# Altium integrated library PC_Int_Lib.IntLib: 59 symbols (part 2 of 2)
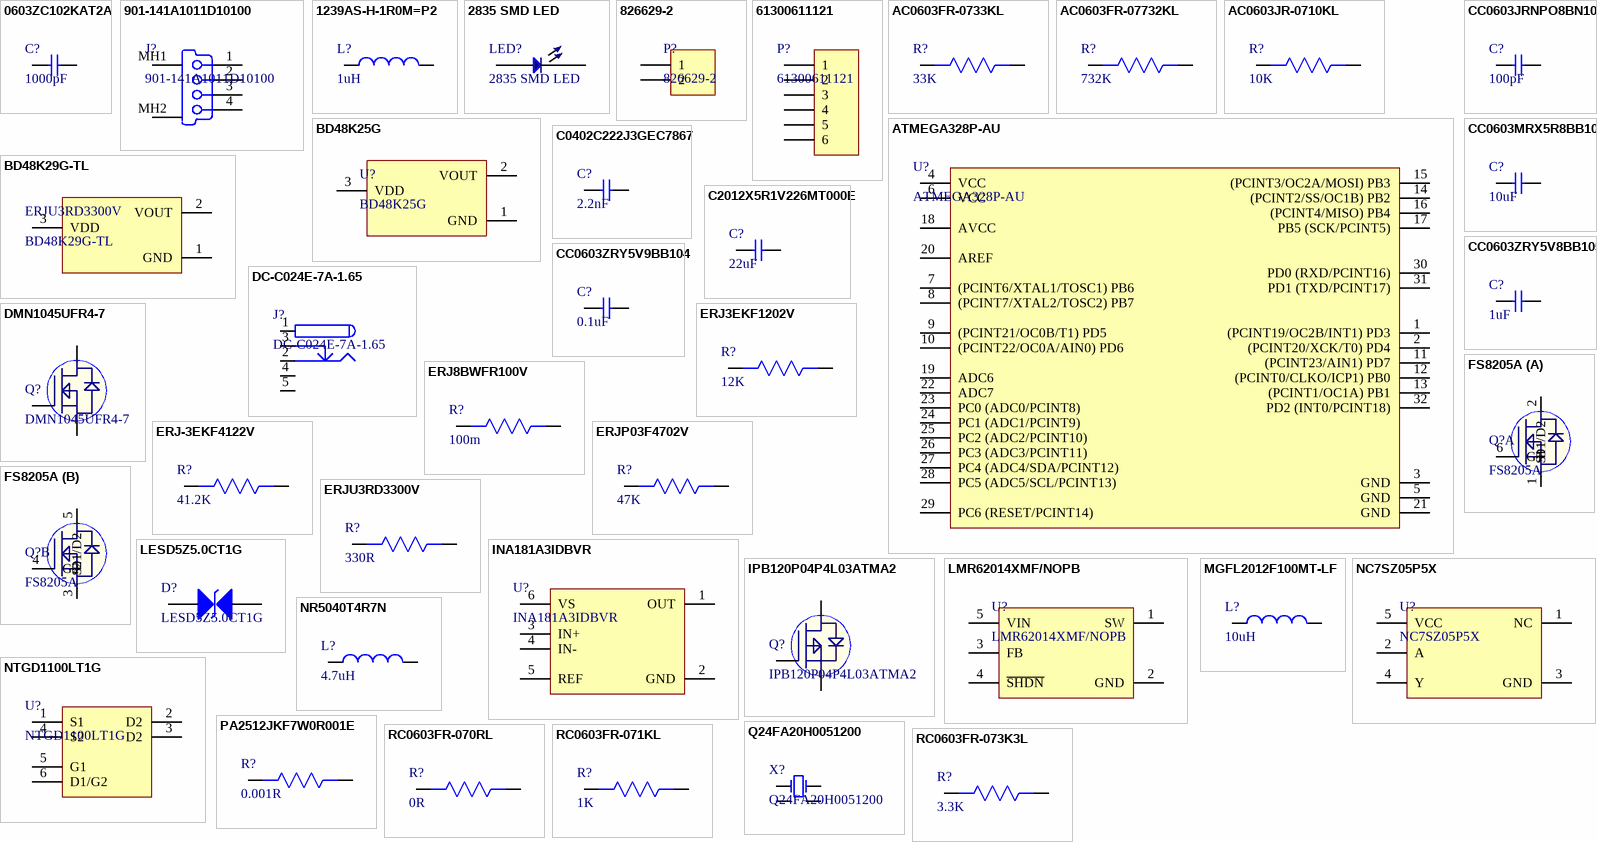
[diagram p2: symbols 0603ZC102KAT2A to RC0603FR-073K3L]

## LMR62014XMF/NOPB
designator U?
IC REG BOOST ADJ 2A SOT23-5; Manufacturer: TI National Semiconductor; Output Type: Adjustable; Output Configuration: Positive; Switching Frequency: 1.6MHz; Max Output Current: 1.4A; Min Input Voltage: 2.7V; Max Input Voltage: 14V; Number of Outputs: 1; Output Voltage: 20V; Quiescent Current: 2mA; Min Output Voltage: 3V; Synchronous Rectifier: No; Supplier 1: Digi-Key; Manufacturer Part Number: LMR62014XMF/NOPB; RoHS: Yes; Category: Power Supply Modules; Stock 1: 5493; Pricing 1: 1=0.96000, 10=0.86000, 25=0.81600, 100=0.67040, 250=0.62672, 500=0.55384 (USD); Mount: Surface Mount; Case/Package: SOT-23-5; Number of Pins: 5; Contact Plating: Tin,Matte; Min Operating Temperature: -40°C; Max Operating Temperature: 125°C; Output Current: 1.4A; Packaging: Tape and Reel; Package Quantity: 1000; Topology: Boost; Max Output Voltage: 20V; Radiation Hardening: No; REACH SVHC: No SVHC; Lead Free: Lead Free; ComponentLink1URL: https://datasheet.ciiva.com/3231/lmr62014-3231410.pdf?src-supplier=Avnet; ComponentLink1Description: https://datasheet.ciiva.com/3231/lmr62014-3231410.pdf?src-supplier=Avnet; ComponentLink2URL: https://datasheet.ciiva.com/23854/1777788-23854326.pdf?src-supplier=Newark; ComponentLink2Description: https://datasheet.ciiva.com/23854/1777788-23854326.pdf?src-supplier=Newark; ComponentLink3URL: https://datasheet.ciiva.com/4879/snvs735a-74121-4879731.pdf?src-supplier=Mouser; ComponentLink3Description: https://datasheet.ciiva.com/4879/snvs735a-74121-4879731.pdf?src-supplier=Mouser; ComponentLink4URL: https://datasheet.ciiva.com/22669/1716576-22669414.pdf?src-supplier=Element14; ComponentLink4Description: https://datasheet.ciiva.com/22669/1716576-22669414.pdf?src-supplier=Element14; ComponentLink5URL: https://datasheet.ciiva.com/6603/lmr62014-6603804.pdf?src-supplier=Digi-Key; ComponentLink5Description: https://datasheet.ciiva.com/6603/lmr62014-6603804.pdf?src-supplier=Digi-Key; ComponentLink6URL: https://datasheet.ciiva.com/6603/lmr62014-6603807.pdf?src-supplier=Digi-Key; ComponentLink6Description: https://datasheet.ciiva.com/6603/lmr62014-6603807.pdf?src-supplier=Digi-Key; Supplier Part Number 1: LMR62014XMF/NOPBCT-ND
footprint SOT23-5 (SOT23-5 Package)
pins: 1 SW, 2 GND, 3 FB, 4 ~{SH}~{DN}, 5 VIN

## MGFL2012F100MT-LF
designator L?, comment 10uH
500mA 10uH ±20% 320mΩ 0805 Inductors; Manufacturer: Microgate; Manufacturer Part No:: MGFL2012F100MT-LF; Value: 10uH; Package: 0805; ComponentLink1Description: New link; ComponentLink1URL: https://lcsc.com/product-detail/Inductors-SMD_microgate-MGFL2012F100MT-LF_C281113.html
footprint Ind0805 (Inductor 0805)
pins: 1, 2

## NC7SZ05P5X
designator U?
IC INVERTER OD 1CH 1-INP SC70-5; Manufacturer: ON Semiconductor / Fairchild; Number of Terminals/Pins: 5; Number of Circuits: 1; Max Supply Voltage: 5.5V; Min Supply Voltage: 1.65V; Propagation Delay: 13.4ns; Logic Function: Buffer,Inverter; Output Current: 32mA; Quiescent Current: 2uA; Turn-On Delay Time: 4.3ns; Polarity: Inverting; Schmitt Trigger Input: No; Input Type: SINGLE-ENDED; ComponentLink1URL: https://datasheet.ciiva.com/3231/lmr62014-3231410.pdf?src-supplier=Avnet; ComponentLink1Description: https://datasheet.ciiva.com/3231/lmr62014-3231410.pdf?src-supplier=Avnet; ComponentLink2URL: https://datasheet.ciiva.com/23854/1777788-23854326.pdf?src-supplier=Newark; ComponentLink2Description: https://datasheet.ciiva.com/23854/1777788-23854326.pdf?src-supplier=Newark; ComponentLink3URL: https://datasheet.ciiva.com/4879/snvs735a-74121-4879731.pdf?src-supplier=Mouser; ComponentLink3Description: https://datasheet.ciiva.com/4879/snvs735a-74121-4879731.pdf?src-supplier=Mouser; ComponentLink4URL: https://datasheet.ciiva.com/22669/1716576-22669414.pdf?src-supplier=Element14; ComponentLink4Description: https://datasheet.ciiva.com/22669/1716576-22669414.pdf?src-supplier=Element14; ComponentLink5URL: https://datasheet.ciiva.com/6603/lmr62014-6603804.pdf?src-supplier=Digi-Key; ComponentLink5Description: https://datasheet.ciiva.com/6603/lmr62014-6603804.pdf?src-supplier=Digi-Key; ComponentLink6URL: https://datasheet.ciiva.com/6603/lmr62014-6603807.pdf?src-supplier=Digi-Key; ComponentLink6Description: https://datasheet.ciiva.com/6603/lmr62014-6603807.pdf?src-supplier=Digi-Key; Supplier 1: Digi-Key; Manufacturer Part Number: NC7SZ05P5X; RoHS: Yes; Category: Amplifiers - Op Amps, Buffer, Instrumentation; Stock 1: 165573; Pricing 1: 1=0.41000, 10=0.30800, 25=0.26920, 100=0.17430, 250=0.14428, 500=0.11544, 1000=0.08850 (USD); Mount: Surface Mount; Case/Package: SC; Number of Pins: 5; Weight: 23g; Min Operating Temperature: -40°C; Max Operating Temperature: 85°C; Packaging: Tape and Reel; Package Quantity: 1; Low Level Output Current: 32mA; Number of Gates: 1; Number of Channels: 1; Number of Inputs: 1; Number of Outputs: 1; Max Output Current: 32mA; Number of Elements: 1; Termination: SMD/SMT; Series: 7SZ; Technology: CMOS; Number of Functions: 1; Supply Voltage-Nom: 5.5V; Length: 2mm; Width: 1.25mm; Height: 1mm; Radiation Hardening: No; REACH SVHC: No SVHC; Lead Free: Lead Free; RoHS Compliant: Yes; ComponentLink7URL: https://datasheet.ciiva.com/5701/678459-5701517.pdf?src-supplier=Farnell; ComponentLink7Description: https://datasheet.ciiva.com/5701/678459-5701517.pdf?src-supplier=Farnell; ComponentLink8URL: https://datasheet.ciiva.com/26097/nc7sz05-26097353.pdf?src-supplier=Avnet+Europe; ComponentLink8Description: https://datasheet.ciiva.com/26097/nc7sz05-26097353.pdf?src-supplier=Avnet+Europe; ComponentLink9URL: https://datasheet.ciiva.com/46415/678459-46415099.pdf?src-supplier=Element14; ComponentLink9Description: https://datasheet.ciiva.com/46415/678459-46415099.pdf?src-supplier=Element14; ComponentLink10URL: https://datasheet.ciiva.com/16783/nc7sz05-16783085.pdf?src-supplier=Future+Electronics; ComponentLink10Description: https://datasheet.ciiva.com/16783/nc7sz05-16783085.pdf?src-supplier=Future+Electronics; ComponentLink11URL: https://datasheet.ciiva.com/1861/nc7sz05-1861934.pdf?src-supplier=Digi-Key; ComponentLink11Description: https://datasheet.ciiva.com/1861/nc7sz05-1861934.pdf?src-supplier=Digi-Key; ComponentLink12URL: https://datasheet.ciiva.com/7970/678459-7970639.pdf?src-supplier=Element14; ComponentLink12Description: https://datasheet.ciiva.com/7970/678459-7970639.pdf?src-supplier=Element14; ComponentLink13URL: https://datasheet.ciiva.com/1861/nc7sz05-1861932.pdf?src-supplier=Digi-Key; ComponentLink13Description: https://datasheet.ciiva.com/1861/nc7sz05-1861932.pdf?src-supplier=Digi-Key; ComponentLink14URL: https://datasheet.ciiva.com/5701/nc7sz05-5701516.pdf?src-supplier=Farnell; ComponentLink14Description: https://datasheet.ciiva.com/5701/nc7sz05-5701516.pdf?src-supplier=Farnell; ComponentLink15URL: https://datasheet.ciiva.com/1861/nc7sz05-1861933.pdf?src-supplier=Digi-Key; ComponentLink15Description: https://datasheet.ciiva.com/1861/nc7sz05-1861933.pdf?src-supplier=Digi-Key; Supplier Part Number 1: NC7SZ05P5XCT-ND
footprint NC7SZ05P5X
pins: 1 NC, 2 A, 3 GND, 4 Y, 5 VCC

## NR5040T4R7N
designator L?, comment 4.7uH
Inductor Power Shielded Wirewound 4.7uH 30% 100KHz Ferrite 3.1A 0.0377Ohm DCR T/R; Manufacturer: Taiyo Yuden; Manufacturer Part Number: NR5040T4R7N; Self Resonant Frequency: 28MHz; Saturation Current: 3.3A; DC Resistance (DCR): 37.7mR; Supplier 1: Digi-Key; RoHS: Yes; Category: Fixed Inductors; Stock 1: 62864; Pricing 1: 1=0.48000, 10=0.42700, 25=0.37360, 50=0.32000, 100=0.29340, 250=0.26676, 500=0.25074 (USD); Mount: Surface Mount; Case/Package: Nonstandard; Number of Pins: 2; Core Material: Ferrite; Min Operating Temperature: -25°C; Max Operating Temperature: 120°C; Packaging: Tape and Reel; Inductance Tolerance: 30%; Package Quantity: 1500; Current Rating: 3.1A; Tolerance: 30%; Shielding: Shielded; Inductance: 4.7uH; Max DC Current: 3.3A; Termination: SMD/SMT; Resistor Type: Wirewound; Test Frequency: 100kHz; RMS Current (Irms): 3.1A; Series: NR; Length: 0.193inch; Width: 4.9mm; Height: 4mm; Height - Seated (Max): 0.161inch; Depth: 5.1mm; Radiation Hardening: No; REACH SVHC: Unknown; Halogen Free: Halogen Free; RoHS Compliant: Yes; ComponentLink1URL: https://datasheet.ciiva.com/8502/nr5040t4r7n-ss-8502907.pdf?src-supplier=Avnet; ComponentLink1Description: https://datasheet.ciiva.com/8502/nr5040t4r7n-ss-8502907.pdf?src-supplier=Avnet; ComponentLink2URL: https://datasheet.ciiva.com/1044/wound04-e-1044092.pdf?src-supplier=Digi-Key; ComponentLink2Description: https://datasheet.ciiva.com/1044/wound04-e-1044092.pdf?src-supplier=Digi-Key; ComponentLink3URL: https://datasheet.ciiva.com/1044/wound04-e-1044093.pdf?src-supplier=Digi-Key; ComponentLink3Description: https://datasheet.ciiva.com/1044/wound04-e-1044093.pdf?src-supplier=Digi-Key; ComponentLink4URL: https://datasheet.ciiva.com/4960/wound04-e-4960327.pdf?src-supplier=Mouser; ComponentLink4Description: https://datasheet.ciiva.com/4960/wound04-e-4960327.pdf?src-supplier=Mouser; ComponentLink5URL: https://datasheet.ciiva.com/1044/wound04-e-1044091.pdf?src-supplier=Digi-Key; ComponentLink5Description: https://datasheet.ciiva.com/1044/wound04-e-1044091.pdf?src-supplier=Digi-Key; Supplier Part Number 1: 587-2373-1-ND
footprint NR5040T4R7N
pins: 1, 2

## NTGD1100LT1G
designator U?
IC PWR DRIVER P-CHAN 1:1 6TSOP; Manufacturer: onsemi; Manufacturer Part No:: NTGD1100LT1G; Package: Custom; ComponentLink1Description: New link; ComponentLink1URL: https://www.digikey.co.uk/en/products/detail/onsemi/NTGD1100LT1G/1484846
footprint NTGD1100LT1G
pins: 1 S1, 2 D2, 3 D2, 4 S2, 5 G1, 6 D1/G2

## PA2512JKF7W0R001E
designator R?, comment 0.001R
RES 0.001 OHM 5% 2W 2512; Manufacturer: YEGEO; Manufacturer Part No:: PA2512JKF7W0R001E; Value: 0.001R; Package: 2512; ComponentLink1Description: New link; ComponentLink1URL: https://www.digikey.ca/en/products/detail/yageo/PA2512JKF7W0R001E/5913675?s=N4IgTCBcDaIAoEEwFYCMYBSBpAYgdgHUAGAJSKNQFEQBdAXyA
footprint RES 2512
pins: 1, 2

## Q24FA20H0051200
designator X?
16MHz SMD Crystal Resonator 10pF 80Ω ±10ppm; Manufacturer: Seiko Epson; Frequency: 16MHz; Crystal Type: SMD Crystal; Load Capacitance: 10pF; Equivalent Series Resistance (ESR): 80Ω; Frequency Tolerance: ±10ppm; Operating Temperature: -40℃~+85℃
footprint Q24FA20H0051200 (16MHz SMD Crystal Resonator 10pF 80O ±10ppm)
pins: 1 OSC1, 2 GND, 3 OSC2, 4 GND

## RC0603FR-070RL
designator R?, comment 0R
RES SMD 0R, 1%, 0.1W, 0603; Manufacturer: Yageo; Manufacturer Part Number: RC0603FR-070RL; Resistance: 0mR; Power Rating: 100mW; Voltage Rating (DC): 50V; Temperature Coefficient: 200ppm/°C; Current Rating: 1A; Working Voltage: 75V; Supplier 1: Arrow Electronics; RoHS: Yes; Category: Chip SMD Resistors; Stock 1: 1270000; Pricing 1: 5000=0.00320, 5000=0.00490, 50000=0.00450, 500000=0.00250, 2500000=0.00150 (USD); Case/Package: 0603; Number of Pins: 2; Contact Plating: Tin,Matte; Case Code (Metric): 1608; Case Code (Imperial): 0603; Min Operating Temperature: -55°C; Max Operating Temperature: 155°C; Resistor Type: Thick Film; Packaging: Tape and Reel; Tolerance: 1%; Package Quantity: 5000; Voltage Rating: 50V; Number of Terminations: 2; Termination: SMD/SMT; Max Power Dissipation: 100mW; Features: Moisture Resistant; Length: 1.6mm; Width: 0.031inch; Height: 0.45mm; Depth: 0.8mm; Radiation Hardening: No; REACH SVHC: No SVHC; Lead Free: Lead Free; Military Standard: Not; ComponentLink1URL: https://datasheet.ciiva.com/11808/0900766b80f96399-11808172.pdf?src-supplier=RSComponents; ComponentLink1Description: https://datasheet.ciiva.com/11808/0900766b80f96399-11808172.pdf?src-supplier=RSComponents; ComponentLink2URL: https://datasheet.ciiva.com/5558/rc0603-272842-5558341.pdf?src-supplier=Mouser; ComponentLink2Description: https://datasheet.ciiva.com/5558/rc0603-272842-5558341.pdf?src-supplier=Mouser; ComponentLink3URL: https://datasheet.ciiva.com/46382/443971-46382072.pdf?src-supplier=Element14; ComponentLink3Description: https://datasheet.ciiva.com/46382/443971-46382072.pdf?src-supplier=Element14; ComponentLink4URL: https://datasheet.ciiva.com/29721/pyu-r-int-thick-7-29721178.pdf?src-supplier=Digi-Key; ComponentLink4Description: https://datasheet.ciiva.com/29721/pyu-r-int-thick-7-29721178.pdf?src-supplier=Digi-Key; ComponentLink5URL: https://datasheet.ciiva.com/5684/443971-5684699.pdf?src-supplier=Farnell; ComponentLink5Description: https://datasheet.ciiva.com/5684/443971-5684699.pdf?src-supplier=Farnell; ComponentLink6URL: https://datasheet.ciiva.com/7983/443971-7983627.pdf?src-supplier=Element14; ComponentLink6Description: https://datasheet.ciiva.com/7983/443971-7983627.pdf?src-supplier=Element14; ComponentLink7URL: https://datasheet.ciiva.com/29721/pyu-rc0603-51-rohs-l-4-29721179.pdf?src-supplier=Digi-Key; ComponentLink7Description: https://datasheet.ciiva.com/29721/pyu-rc0603-51-rohs-l-4-29721179.pdf?src-supplier=Digi-Key; ComponentLink8URL: https://datasheet.ciiva.com/22643/1868787-22643388.pdf?src-supplier=Element14; ComponentLink8Description: https://datasheet.ciiva.com/22643/1868787-22643388.pdf?src-supplier=Element14; Supplier Part Number 1: RC0603FR-070RL
footprint Res0603
pins: 1, 2

## RC0603FR-071KL
designator R?, comment 1K
RES SMD 1K OHM 1% 1/10W 0603; Manufacturer: Yageo; Manufacturer Part Number: RC0603FR-071KL; Resistance: 1kR; Temperature Coefficient: 100ppm/°C; Power Rating: 100mW; Voltage Rating: 50V; ComponentLink1URL: https://www.verical.com/server-webapp/html/getDatasheet?partID=409289&src-supplier=Verical; ComponentLink1Description: https://www.verical.com/server-webapp/html/getDatasheet?partID=409289&src-supplier=Verical; Supplier 1: Digi-Key; Stock 1: 21472395; Pricing 1: 1=0.1, 10=0.023, 100=0.0094, 1000=0.0042, 2500=0.0037 (USD); Case/Package: 0603; Contact Plating: Tin,Matte; Case Code (Imperial): 0603; Case Code (Metric): 1608; Min Operating Temperature: -55°C; Max Operating Temperature: 155°C; Tolerance: 1%; Composition: Thick Film; Packaging: Tape and Reel; Termination: SMD/SMT; Military Standard: Not; Length: 1.6mm; Height: 0.45mm; Depth: 0.8mm; Radiation Hardening: No; REACH SVHC: No SVHC; Lead Free: Lead Free; ComponentLink2URL: http://documents.rs-components.com/techlib://itc_doclist_GB.htm?stockno=5048928&src-supplier=RSComponents; ComponentLink2Description: http://documents.rs-components.com/techlib://itc_doclist_GB.htm?stockno=5048928&src-supplier=RSComponents; ComponentLink3URL: http://www.yageo.com/documents/recent/PYu-RC0603_51_RoHS_L_4.pdf?src-supplier=Avnet+Europe; ComponentLink3Description: http://www.yageo.com/documents/recent/PYu-RC0603_51_RoHS_L_4.pdf?src-supplier=Avnet+Europe; ComponentLink4URL: http://www.farnell.com/datasheets/2167052.pdf?src-supplier=Element14; ComponentLink4Description: http://www.farnell.com/datasheets/2167052.pdf?src-supplier=Element14; ComponentLink5URL: http://www.farnell.com/datasheets/1868787.pdf?src-supplier=Element14; ComponentLink5Description: http://www.farnell.com/datasheets/1868787.pdf?src-supplier=Element14; ComponentLink6URL: http://www.yageo.com/documents/recent/PYu-RC_Group_51_RoHS_L_2.pdf?src-supplier=Avnet; ComponentLink6Description: http://www.yageo.com/documents/recent/PYu-RC_Group_51_RoHS_L_2.pdf?src-supplier=Avnet; ComponentLink7URL: https://www.verical.com/server-webapp/html/getDatasheet?partID=404327&src-supplier=Verical; ComponentLink7Description: https://www.verical.com/server-webapp/html/getDatasheet?partID=404327&src-supplier=Verical; ComponentLink8URL: http://www.farnell.com/datasheets/443971.pdf?src-supplier=Element14; ComponentLink8Description: http://www.farnell.com/datasheets/443971.pdf?src-supplier=Element14; Supplier Part Number 1: 311-1.00KHRDKR-ND
footprint Res0603
pins: 1, 2

## RC0603FR-073K3L
designator R?, comment 3.3K
RES SMD 3.3K OHM 1% 1/10W 0603; Manufacturer: Yageo Phycomp; Manufacturer Part Number: RC0603FR-073K3L; Temperature Coefficient: 100ppm/°C; Resistance: 3.3kR; Voltage Rating (DC): 50V; Power Rating: 100mW; Supplier 1: Digi-Key; Stock 1: 6863000; Pricing 1: 1=0.1, 10=0.024, 100=0.0097, 1000=0.00437, 2500=0.00379 (USD); Mount: Surface Mount; Case/Package: 0603; Number of Pins: 2; Min Operating Temperature: -55°C; Max Operating Temperature: 155°C; Tolerance: 1%; Packaging: Cut Tape; Length: 1.6mm; Height: 0.45mm; Width: 800um; Depth: 0.8mm; REACH SVHC: No SVHC; Lead Free: Lead Free; Supplier Part Number 1: 311-3.30KHRCT-ND
footprint Res0603
pins: 1, 2

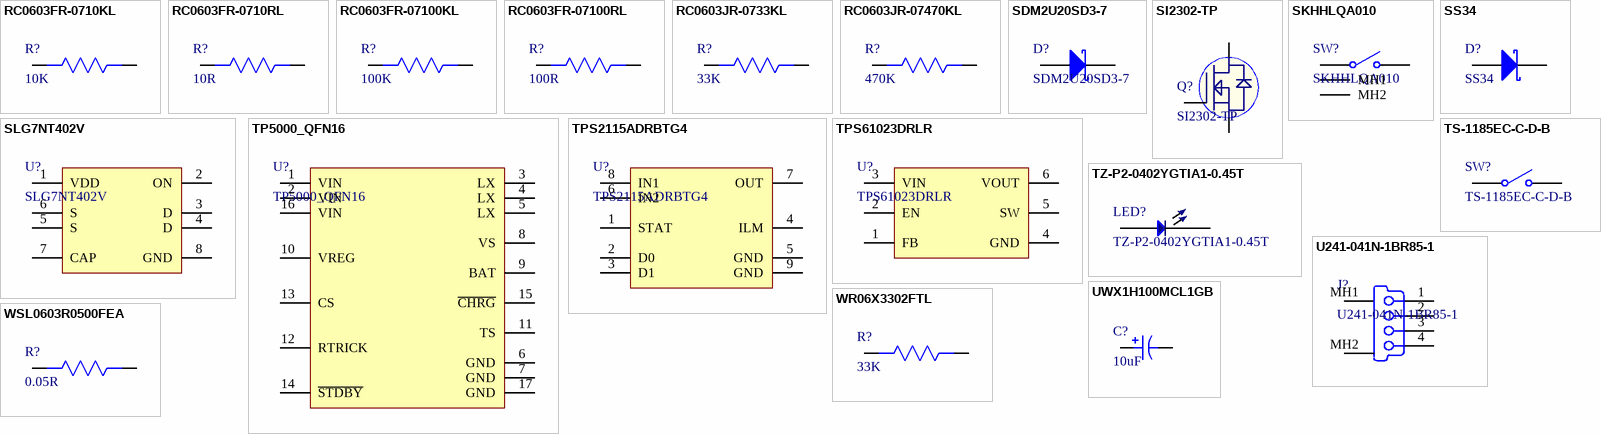
[diagram p1: symbols RC0603FR-0710KL to WSL0603R0500FEA]

## RC0603FR-0710KL
designator R?, comment 10K
RES 10K OHM 1% 1/10W 0603; Manufacturer: Yageo; Manufacturer Part Number: RC0603FR-0710KL; Resistance: 10kR; Temperature Coefficient: 100ppm/°C; Voltage Rating: 75V; Voltage Rating (DC): 50V; Power Rating: 100mW; ComponentLink1URL: https://www.verical.com/server-webapp/html/getDatasheet?partID=409289&src-supplier=Verical; ComponentLink1Description: https://www.verical.com/server-webapp/html/getDatasheet?partID=409289&src-supplier=Verical; ComponentLink2URL: http://documents.rs-components.com/techlib://itc_doclist_GB.htm?stockno=5048928&src-supplier=RSComponents; ComponentLink2Description: http://documents.rs-components.com/techlib://itc_doclist_GB.htm?stockno=5048928&src-supplier=RSComponents; ComponentLink3URL: http://www.yageo.com/documents/recent/PYu-RC0603_51_RoHS_L_4.pdf?src-supplier=Avnet+Europe; ComponentLink3Description: http://www.yageo.com/documents/recent/PYu-RC0603_51_RoHS_L_4.pdf?src-supplier=Avnet+Europe; ComponentLink4URL: http://www.farnell.com/datasheets/2167052.pdf?src-supplier=Element14; ComponentLink4Description: http://www.farnell.com/datasheets/2167052.pdf?src-supplier=Element14; ComponentLink5URL: http://www.farnell.com/datasheets/1868787.pdf?src-supplier=Element14; ComponentLink5Description: http://www.farnell.com/datasheets/1868787.pdf?src-supplier=Element14; ComponentLink6URL: http://www.yageo.com/documents/recent/PYu-RC_Group_51_RoHS_L_2.pdf?src-supplier=Avnet; ComponentLink6Description: http://www.yageo.com/documents/recent/PYu-RC_Group_51_RoHS_L_2.pdf?src-supplier=Avnet; ComponentLink7URL: https://www.verical.com/server-webapp/html/getDatasheet?partID=404327&src-supplier=Verical; ComponentLink7Description: https://www.verical.com/server-webapp/html/getDatasheet?partID=404327&src-supplier=Verical; ComponentLink8URL: http://www.farnell.com/datasheets/443971.pdf?src-supplier=Element14; ComponentLink8Description: http://www.farnell.com/datasheets/443971.pdf?src-supplier=Element14; Supplier 1: Digi-Key; Stock 1: 6533082; Pricing 1: 1=0.1, 10=0.024, 100=0.0097, 1000=0.0044, 2500=0.0038 (USD); Case/Package: 0603; Number of Pins: 2; Case Code (Imperial): 0603; Case Code (Metric): 1608; Weight: 7.1E-05oz; Size Code: 0603; Min Operating Temperature: -55°C; Max Operating Temperature: 155°C; Tolerance: 1%; Resistor Type: Thick Film; Packaging: Tape and Reel; Termination: SMD/SMT; Features: Moisture Resistant; Series: RC; Max Power Dissipation: 100mW; Number of Terminations: 2; Resistance Tolerance: 1%; Construction: Rectangular; Length: 1.6mm; Width: 0.8mm; Height: 0.45mm; Depth: 0.8mm; Lead Pitch: 0.3mm; RoHS Compliant: Yes; REACH SVHC: Unknown; Military Standard: Not; Lead Free: Lead Free; ComponentLink9URL: http://www.farnell.com/datasheets/38590.pdf?src-supplier=Element14; ComponentLink9Description: http://www.farnell.com/datasheets/38590.pdf?src-supplier=Element14; Supplier Part Number 1: 311-10.0KHRCT-ND
footprint Res0603
pins: 1, 2

## RC0603FR-0710RL
designator R?, comment 10R
RES SMD 10 OHM 1% 1/10W 0603; Manufacturer: Yageo; Manufacturer Part Number: RC0603FR-0710RL; Temperature Coefficient: 200ppm/°C; Power Rating: 100mW; Voltage Rating: 50V; Supplier 1: Digi-Key; Stock 1: 10836596; Pricing 1: 1=0.1, 10=0.046, 100=0.0187, 1000=0.0084, 2500=0.00729 (USD); Case/Package: 0603; Number of Pins: 2; Case Code (Imperial): 0603; Case Code (Metric): 1608; Contact Plating: Tin,Matte; Min Operating Temperature: -55°C; Max Operating Temperature: 155°C; Resistance: 10R; Tolerance: 1%; Composition: Thick Film; Packaging: Tape and Reel; Voltage Rating (DC): 50V; Termination: SMD/SMT; Military Standard: Not; Length: 1.6mm; Height: 0.45mm; Width: 0.8mm; Depth: 0.8mm; Radiation Hardening: No; Lead Free: Lead Free; REACH SVHC: No SVHC; ComponentLink1URL: http://www.farnell.com/datasheets/1868787.pdf?src-supplier=Element14; ComponentLink1Description: http://www.farnell.com/datasheets/1868787.pdf?src-supplier=Element14; ComponentLink2URL: http://www.yageo.com/documents/recent/PYu-RC0603_51_RoHS_L_4.pdf?src-supplier=Avnet; ComponentLink2Description: http://www.yageo.com/documents/recent/PYu-RC0603_51_RoHS_L_4.pdf?src-supplier=Avnet; ComponentLink3URL: http://documents.rs-components.com/techlib://itc_doclist_GB.htm?stockno=5048984&src-supplier=RSComponents; ComponentLink3Description: http://documents.rs-components.com/techlib://itc_doclist_GB.htm?stockno=5048984&src-supplier=RSComponents; ComponentLink4URL: http://www.yageo.com/documents/recent/PYu-RC0603_51_RoHS_L_4.pdf?src-supplier=Avnet+Europe; ComponentLink4Description: http://www.yageo.com/documents/recent/PYu-RC0603_51_RoHS_L_4.pdf?src-supplier=Avnet+Europe; Supplier Part Number 1: 311-10.0HRDKR-ND
footprint Res0603
pins: 1, 2

## RC0603FR-07100KL
designator R?, comment 100K
RES 100K OHM 1% 1/10W 0603; Manufacturer: Yageo; Manufacturer Part Number: RC0603FR-07100KL; Resistance: 100kR; Temperature Coefficient: 100ppm/°C; Voltage Rating (DC): 50V; Power Rating: 100mW; Working Voltage: 75V; Supplier 1: Digi-Key; RoHS: Yes; Category: Chip SMD Resistors; Stock 1: 4230938; Pricing 1: 1=0.10000, 10=0.02400, 100=0.00970, 1000=0.00436, 2500=0.00378 (USD); Case/Package: 0603; Number of Pins: 2; Case Code (Imperial): 0603; Case Code (Metric): 1608; Min Operating Temperature: -55°C; Max Operating Temperature: 155°C; Tolerance: 1%; Resistor Type: Thick Film; Packaging: Tape and Reel; Voltage Rating: 50V; Termination: SMD/SMT; Number of Terminations: 2; Features: Moisture Resistant; Series: RC; Max Power Dissipation: 100mW; Resistance Tolerance: 1%; Construction: Rectangular; Technology: THICK FILM; Length: 1.6mm; Width: 0.8mm; Height: 0.45mm; Depth: 0.8mm; REACH SVHC: No SVHC; Lead Free: Lead Free; Military Standard: Not; RoHS Compliant: Yes; Supplier Part Number 1: 311-100KHRCT-ND
footprint Res0603
pins: 1, 2

## RC0603FR-07100RL
designator R?, comment 100R
RES SMD 100 OHM 1% 1/10W 0603; Manufacturer: Yageo; Manufacturer Part Number: RC0603FR-07100RL; Temperature Coefficient: 100ppm/°C; Voltage Rating (DC): 50V; Power Rating: 100mW; Supplier 1: Arrow Electronics; RoHS: Yes; Category: Chip SMD Resistors; Stock 1: 3800000; Pricing 1: 5000=0.00300, 5000=0.00200, 5000=0.00450, 50000=0.00410, 500000=0.00230, 2500000=0.00140 (USD); Case/Package: 0603; Number of Pins: 2; Case Code (Imperial): 0603; Case Code (Metric): 1608; Size Code: 0603; Min Operating Temperature: -55°C; Max Operating Temperature: 155°C; Resistance: 100R; Tolerance: 1%; Resistor Type: Thick Film; Packaging: Tape and Reel; Voltage Rating: 50V; Termination: SMD/SMT; Features: Moisture Resistant; Series: RC; Max Power Dissipation: 100mW; Number of Terminations: 2; Construction: Rectangular; Resistance Tolerance: 1%; Technology: THICK FILM; Length: 1.6mm; Width: 0.8mm; Height: 0.45mm; Depth: 0.8mm; REACH SVHC: Unknown; Lead Free: Lead Free; RoHS Compliant: Yes; Military Standard: Not; Supplier Part Number 1: RC0603FR-07100RL
footprint Res0603
pins: 1, 2

## RC0603JR-0733KL
designator R?, comment 33K
Res General Purpose Thick Film 0603 33K Ohm 5% 1/10W ±100ppm/°C Molded SMD Paper T/R; Manufacturer: Yageo; Manufacturer Part Number: RC0603JR-0733KL; Resistance: 33kR; Power Rating: 100mW; Voltage Rating: 75V; Voltage Rating (DC): 50V; Supplier 1: Digi-Key; RoHS: Yes; Category: Chip SMD Resistors; Stock 1: 224875; Pricing 1: 1=0.10000, 10=0.02000, 100=0.00800, 1000=0.00360, 2500=0.00312 (USD); Case/Package: 0603; Number of Pins: 2; Case Code (Metric): 1608; Case Code (Imperial): 0603; Weight: 7.1E-05oz; Size Code: 0603; Min Operating Temperature: -55°C; Max Operating Temperature: 155°C; Tolerance: 5%; Packaging: Tape and Reel; Package Quantity: 1; Resistor Type: Thick Film; Number of Terminations: 2; Termination: SMD/SMT; Temperature Coefficient: 100ppm/°C; Max Power Dissipation: 100mW; Features: Moisture Resistant; Series: RC; Resistance Tolerance: 5%; Construction: Rectangular; Length: 1.6mm; Width: 0.8mm; Height: 0.022inch; Depth: 0.8mm; REACH SVHC: No SVHC; Military Standard: Not; Lead Free: Lead Free; RoHS Compliant: Yes; ComponentLink1URL: https://datasheet.ciiva.com/2452/pyu-r-int-thick-7-2452918.pdf?src-supplier=Digi-Key; ComponentLink1Description: https://datasheet.ciiva.com/2452/pyu-r-int-thick-7-2452918.pdf?src-supplier=Digi-Key; ComponentLink2URL: https://datasheet.ciiva.com/2452/pyu-r-int-thick-7-2452919.pdf?src-supplier=Digi-Key; ComponentLink2Description: https://datasheet.ciiva.com/2452/pyu-r-int-thick-7-2452919.pdf?src-supplier=Digi-Key; ComponentLink3URL: https://datasheet.ciiva.com/7746/443971-7746489.pdf?src-supplier=Element14; ComponentLink3Description: https://datasheet.ciiva.com/7746/443971-7746489.pdf?src-supplier=Element14; ComponentLink4URL: https://datasheet.ciiva.com/7746/443971-7746490.pdf?src-supplier=Element14; ComponentLink4Description: https://datasheet.ciiva.com/7746/443971-7746490.pdf?src-supplier=Element14; ComponentLink5URL: https://datasheet.ciiva.com/46395/443971-46395146.pdf?src-supplier=Element14; ComponentLink5Description: https://datasheet.ciiva.com/46395/443971-46395146.pdf?src-supplier=Element14; ComponentLink6URL: https://datasheet.ciiva.com/15189/getdatasheetpartid-343810-15189869.pdf?src-supplier=Verical; ComponentLink6Description: https://datasheet.ciiva.com/15189/getdatasheetpartid-343810-15189869.pdf?src-supplier=Verical; Supplier Part Number 1: 311-33KGRCT-ND
footprint Res0603
pins: 1, 2

## RC0603JR-07470KL
designator R?, comment 470K
RES 470K OHM 5% 1/10W 0603; Manufacturer: Yageo; Manufacturer Part Number: RC0603JR-07470KL; Resistance: 470kR; Temperature Coefficient: 100ppm/°C; Voltage Rating (DC): 50V; Power Rating: 100mW; Voltage Rating: 75V; ComponentLink1URL: https://datasheet.ciiva.com/2452/pyu-r-int-thick-7-2452918.pdf?src-supplier=Digi-Key; ComponentLink1Description: https://datasheet.ciiva.com/2452/pyu-r-int-thick-7-2452918.pdf?src-supplier=Digi-Key; ComponentLink2URL: https://datasheet.ciiva.com/2452/pyu-r-int-thick-7-2452919.pdf?src-supplier=Digi-Key; ComponentLink2Description: https://datasheet.ciiva.com/2452/pyu-r-int-thick-7-2452919.pdf?src-supplier=Digi-Key; ComponentLink3URL: https://datasheet.ciiva.com/7746/443971-7746489.pdf?src-supplier=Element14; ComponentLink3Description: https://datasheet.ciiva.com/7746/443971-7746489.pdf?src-supplier=Element14; ComponentLink4URL: https://datasheet.ciiva.com/7746/443971-7746490.pdf?src-supplier=Element14; ComponentLink4Description: https://datasheet.ciiva.com/7746/443971-7746490.pdf?src-supplier=Element14; ComponentLink5URL: https://datasheet.ciiva.com/46395/443971-46395146.pdf?src-supplier=Element14; ComponentLink5Description: https://datasheet.ciiva.com/46395/443971-46395146.pdf?src-supplier=Element14; ComponentLink6URL: https://datasheet.ciiva.com/15189/getdatasheetpartid-343810-15189869.pdf?src-supplier=Verical; ComponentLink6Description: https://datasheet.ciiva.com/15189/getdatasheetpartid-343810-15189869.pdf?src-supplier=Verical; Supplier 1: Digi-Key; Stock 1: 1213798; Pricing 1: 1=0.1, 10=0.02, 100=0.008, 1000=0.0036, 2500=0.0031 (USD); Case/Package: 0603; Number of Pins: 2; Case Code (Metric): 1608; Case Code (Imperial): 0603; Weight: 7.1E-05oz; Size Code: 0603; Min Operating Temperature: -55°C; Max Operating Temperature: 155°C; Tolerance: 5%; Resistor Type: Thick Film; Packaging: Tape and Reel; Package Quantity: 1; Number of Terminations: 2; Termination: SMD/SMT; Max Power Dissipation: 100mW; Features: Moisture Resistant; Series: RC; Resistance Tolerance: 5%; Construction: Rectangular; Length: 1.6mm; Width: 0.8mm; Height: 0.022inch; Depth: 0.8mm; REACH SVHC: No SVHC; Lead Free: Lead Free; Military Standard: Not; RoHS Compliant: Yes; ComponentLink7URL: http://www.yageo.com/documents/recent/PYu-RC_Group_51_RoHS_L_10.pdf?src-supplier=Digi-Key; ComponentLink7Description: http://www.yageo.com/documents/recent/PYu-RC_Group_51_RoHS_L_10.pdf?src-supplier=Digi-Key; ComponentLink8URL: http://www.yageo.com/documents/recent/PYu-RC_Group_51_RoHS_L_9.pdf?src-supplier=Digi-Key; ComponentLink8Description: http://www.yageo.com/documents/recent/PYu-RC_Group_51_RoHS_L_9.pdf?src-supplier=Digi-Key; ComponentLink9URL: http://www.farnell.com/datasheets/1868787.pdf?src-supplier=Element14; ComponentLink9Description: http://www.farnell.com/datasheets/1868787.pdf?src-supplier=Element14; Supplier Part Number 1: 311-470KGRCT-ND
footprint Res0603
pins: 1, 2

## SDM2U20SD3-7
designator D?
DIODE SCHOTTKY 20V 2A SOD323; Manufacturer: Diodes; Supplier 1: Digi-Key; Manufacturer Part Number: SDM2U20SD3-7; RoHS: Yes; Category: Rectifier Diodes; Stock 1: 6; Pricing 1: 1=0.47000, 10=0.35200, 100=0.19930, 500=0.13200, 1000=0.10120 (USD); Mount: Surface Mount; Packaging: Cut Tape; Average Rectified Current: 2A; Max Reverse Voltage (DC): 20V; RoHS Compliant: Yes; ComponentLink1URL: http://www.mouser.com/ds/2/115/SDM2U20SD3-537776.pdf?src-supplier=Mouser; ComponentLink1Description: http://www.mouser.com/ds/2/115/SDM2U20SD3-537776.pdf?src-supplier=Mouser; ComponentLink2URL: https://www.diodes.com/assets/Datasheets/SDM2U20SD3.pdf?src-supplier=Digi-Key; ComponentLink2Description: https://www.diodes.com/assets/Datasheets/SDM2U20SD3.pdf?src-supplier=Digi-Key; ComponentLink3URL: http://diodes.com/datasheets/SDM2U20SD3.pdf?src-supplier=Avnet; ComponentLink3Description: http://diodes.com/datasheets/SDM2U20SD3.pdf?src-supplier=Avnet; Supplier Part Number 1: SDM2U20SD3-7DICT-ND
footprint SDM2U20SD3-7
pins: 1 A, 2 K

## SI2302-TP
designator Q?
SI2302 Series 20 3 A N-Ch Enhancement Mode Field Effect Transistor - SOT-23-3; Manufacturer: MCC; Rds On Max: 72mR; Input Capacitance: 237pF; Drain to Source Voltage (Vdss): 20V; Continuous Drain Current (ID): 3A; Max Power Dissipation: 1.25W; Drain to Source Resistance: 110mR; Number of Elements: 1; Gate to Source Voltage (Vgs): 8V; Polarity: N-CHANNEL; Supplier 1: Digi-Key; Manufacturer Part Number: SI2302-TP; RoHS: Yes; Category: Transistors; Stock 1: 13753; Pricing 1: 1=0.50000, 10=0.40300, 100=0.27460, 500=0.20592, 1000=0.15444 (USD); Mount: Surface Mount; Case/Package: SOT-23; Number of Pins: 3; Min Operating Temperature: -55°C; Max Operating Temperature: 150°C; Packaging: Tape and Reel; Package Quantity: 3000; Drain to Source Breakdown Voltage: 20V; Power Dissipation: 1.25W; Lead Free: Lead Free; RoHS Compliant: Yes; ComponentLink1URL: https://datasheet.ciiva.com/935/si2302sot-23-935107.pdf?src-supplier=Digi-Key; ComponentLink1Description: https://datasheet.ciiva.com/935/si2302sot-23-935107.pdf?src-supplier=Digi-Key; ComponentLink2URL: https://datasheet.ciiva.com/935/si2302sot-23-935109.pdf?src-supplier=Digi-Key; ComponentLink2Description: https://datasheet.ciiva.com/935/si2302sot-23-935109.pdf?src-supplier=Digi-Key; ComponentLink3URL: https://datasheet.ciiva.com/935/si2302sot-23-935108.pdf?src-supplier=Digi-Key; ComponentLink3Description: https://datasheet.ciiva.com/935/si2302sot-23-935108.pdf?src-supplier=Digi-Key; Supplier Part Number 1: SI2302-TPMSCT-ND
footprint SI2302-TP (MOSFET N-CH 20V 3A SOT-23)
pins: 1 G, 2 S, 3 D

## SKHHLQA010
designator SW?
6mm 8.35mm Round Button 50mA 6mm SPST 12V Plugin Tactile Switches; Manufacturer: ALPSALPINE; Manufacturer Part No: SKHHLQA010; Package: Custom; ComponentLink1Description: LCSC; ComponentLink1URL: https://lcsc.com/product-detail/Tactile-Switches_ALPSALPINE-SKHHLQA010_C125034.html
footprint SKHHLQA010
pins: 1, 2, MH1, MH2

## SLG7NT402V
designator U?
IC PWR SWITCH N-CHAN 1:1 8TDFN; Manufacturer: Dialog Semiconductor; Number of Outputs: 1; Output Configuration: High Side; Max Output Current: 4A; ComponentLink1URL: https://datasheet.ciiva.com/3231/lmr62014-3231410.pdf?src-supplier=Avnet; ComponentLink1Description: https://datasheet.ciiva.com/3231/lmr62014-3231410.pdf?src-supplier=Avnet; ComponentLink2URL: https://datasheet.ciiva.com/23854/1777788-23854326.pdf?src-supplier=Newark; ComponentLink2Description: https://datasheet.ciiva.com/23854/1777788-23854326.pdf?src-supplier=Newark; ComponentLink3URL: https://datasheet.ciiva.com/4879/snvs735a-74121-4879731.pdf?src-supplier=Mouser; ComponentLink3Description: https://datasheet.ciiva.com/4879/snvs735a-74121-4879731.pdf?src-supplier=Mouser; ComponentLink4URL: https://datasheet.ciiva.com/22669/1716576-22669414.pdf?src-supplier=Element14; ComponentLink4Description: https://datasheet.ciiva.com/22669/1716576-22669414.pdf?src-supplier=Element14; ComponentLink5URL: https://datasheet.ciiva.com/6603/lmr62014-6603804.pdf?src-supplier=Digi-Key; ComponentLink5Description: https://datasheet.ciiva.com/6603/lmr62014-6603804.pdf?src-supplier=Digi-Key; ComponentLink6URL: https://datasheet.ciiva.com/6603/lmr62014-6603807.pdf?src-supplier=Digi-Key; ComponentLink6Description: https://datasheet.ciiva.com/6603/lmr62014-6603807.pdf?src-supplier=Digi-Key; ComponentLink7URL: https://www.verical.com/server-webapp/html/getDatasheet?partID=705722&src-supplier=Verical; ComponentLink7Description: https://www.verical.com/server-webapp/html/getDatasheet?partID=705722&src-supplier=Verical; ComponentLink8URL: http://rohmfs.rohm.com/en/techdata_basic/ic/package/ssop3_1-e.pdf?src-supplier=Digi-Key; ComponentLink8Description: http://rohmfs.rohm.com/en/techdata_basic/ic/package/ssop3_1-e.pdf?src-supplier=Digi-Key; ComponentLink9URL: http://rohmfs.rohm.com/en/products/databook/datasheet/ic/power/voltage_detector/bd48xxg-e.pdf?src-supplier=Digi-Key; ComponentLink9Description: http://rohmfs.rohm.com/en/products/databook/datasheet/ic/power/voltage_detector/bd48xxg-e.pdf?src-supplier=Digi-Key; Supplier 1: Digi-Key; Manufacturer Part Number: SLG7NT402V; Stock 1: 74575; Pricing 1: 1=0.67, 10=0.591, 25=0.5548, 100=0.4529, 250=0.4206, 500=0.358, 1000=0.2864 (USD); Number of Pins: 8; Min Operating Temperature: -20°C; Max Operating Temperature: 70°C; Packaging: Cut Tape; Supplier Part Number 1: 1827-1124-1-ND
footprint SLG7NT402V
pins: 1 VDD, 2 ON, 3 D, 4 D, 5 S, 6 S, 7 CAP, 8 GND

## SS34
designator D?
40V 550mV 3A 3A SMA(DO-214AC) Schottky Barrier Diodes (SBD); Manufacturer: Changzhou; Value: Custom; Manufacturer Part No: SS34; Package: SMA(DO-214AC); ComponentLink1Description: LCSC; ComponentLink1URL: https://lcsc.com/product-detail/Schottky-Barrier-Diodes-SBD_Changzhou-Starsea-Elec-SS34_C83961.html
footprint SMA (DIODE GEN PURP 50V 1A SMA)
pins: 1 A, 2 K

## TP5000_QFN16
designator U?
QFN-16_4x4x065P Battery Management ICs ROHS; Manufacturer: TOPPOWER; Manufacturer Part No: TP5000_QFN16; Package: 16 QFN 4x4; ComponentLink1Description: LCSC; ComponentLink1URL: https://lcsc.com/product-detail/Battery-Management-ICs_TOPPOWER-Nanjing-Extension-Microelectronics-TP5000-QFN16_C51699.html
footprint 16-QFN (4x4) (battery management IC 16-QFN)
pins: 1 VIN, 2 VIN, 3 LX, 4 LX, 5 LX, 6 GND, 7 GND, 8 VS, 9 BAT, 10 VREG, 11 TS, 12 RTRICK, 13 CS, 14 ~{STDBY}, 15 ~{CHRG}, 16 VIN, 17 GND

## TPS2115ADRBTG4
designator U?
Autoswitching Power Mux 8-SON -40 to 85; Manufacturer: Texas Instruments; Operating Supply Voltage: 5.5V; Number of Outputs: 1; Number of Inputs: 2; Output Current: 1.25A; Min Input Voltage: 2.8V; Turn-On Delay Time: 1ms; Supplier 1: Digi-Key; Manufacturer Part Number: TPS2115ADRBTG4; RoHS: Yes; Category: Integrated Circuits (ICs); Pricing 1: 500=1.58974 (USD); Case/Package: VSON; Number of Pins: 8; Weight: 0.000847oz; Min Operating Temperature: -40°C; Max Operating Temperature: 85°C; Package Quantity: 250; Packaging: Tape and Reel; Max Output Current: 1.25A; Max Input Voltage: 5.5V; Current - Output 2: 1.25A; Series: -; Radiation Hardening: No; Lead Free: Lead Free; RoHS Compliant: Yes; ComponentLink1URL: https://datasheet.ciiva.com/15109/getdatasheetpartid-681241-15109323.pdf?src-supplier=Verical; ComponentLink1Description: https://datasheet.ciiva.com/15109/getdatasheetpartid-681241-15109323.pdf?src-supplier=Verical; ComponentLink2URL: https://datasheet.ciiva.com/3232/tps2115a-3232539.pdf?src-supplier=Avnet; ComponentLink2Description: https://datasheet.ciiva.com/3232/tps2115a-3232539.pdf?src-supplier=Avnet; ComponentLink3URL: https://datasheet.ciiva.com/1961/tps2115a-1961014.pdf?src-supplier=Digi-Key; ComponentLink3Description: https://datasheet.ciiva.com/1961/tps2115a-1961014.pdf?src-supplier=Digi-Key; Supplier Part Number 1: TPS2115ADRBTG4-ND
footprint TPS2115ADRBTG4 (IC OR CTRLR SRC SELECT 8SON)
pins: 1 STAT, 2 D0, 3 D1, 4 ILM, 5 GND, 6 IN2, 7 OUT, 8 IN1, 9 GND

## TPS61023DRLR
designator U?
FINISH GOODS FOR TPS61023; Manufacturer: Texas Instruments; Supplier 1: Digi-Key; Manufacturer Part Number: TPS61023DRLR; RoHS: Yes; Category: Voltage Regulators - Switching; Pricing 1: 1=1.03000, 10=0.91900, 25=0.87240, 100=0.71680, 250=0.67004, 500=0.59212, 1000=0.51450 (USD); Supplier Part Number 1: 296-TPS61023DRLRDKR-ND
footprint TPS61023DRLR (Boost Switching Regulator IC 2.2V 1 Output 3A SOT-563, SOT-666)
pins: 1 FB, 2 EN, 3 VIN, 4 GND, 5 SW, 6 VOUT

## TS-1185EC-C-D-B
designator SW?
3mm 2mm Round Button 50mA Top3.65mm SPST 12V SMD Tactile Switches; Manufacturer: XKB; Manufacturer Part No: TS-1185EC-C-D-B; Package: Custom; ComponentLink1Description: LCSC; ComponentLink1URL: https://lcsc.com/product-detail/Tactile-Switches_XKB-Connectivity-TS-1185EC-C-D-B_C318893.html
footprint TS-1185EC-C-D-B
pins: 1, 2

## TZ-P2-0402YGTIA1-0.45T
designator LED?
Yellow-Green 0402 Light Emitting Diodes; Manufacturer: TUOZHAN; Manufacturer Part no:: TZ-P2-0402YGTIA1-0.45T; Package: 0402; ComponentLink1Description: New link; ComponentLink1URL: https://lcsc.com/product-detail/Light-Emitting-Diodes-LED_TUOZHAN-TZ-P2-0402YGTIA1-0-45T_C688878.html
footprint LED 0402 (Green 520~535nm 0402 Light Emitting Diodes (LED) RoHS)
pins: 1, 2

## U241-041N-1BR85-1
designator J?
USB - Type B 4 USB 2.0 Female Through Hole; Manufacturer: XKB Connectivity; Current Rating: 2A; Number of Ports: 1; Number of Contacts: 4; Mounting Type: ThroughHole，RightAngle; Connector Type: USB - Type B; Standard: USB 2.0; Gender: Female
footprint U241-041N-1BR85-1 (USB - Type B 4 USB 2.0 Female Through Hole)
pins: 1 V BUS (5V) "USB Vcc [Red]", 2 D- "USB Data - [White]", 3 D+ "USB Data + [Green]", 4 GND "Not Connected (or joined to pin 5 via resistor)", MH1 Tab "Shell", MH2 Tab "Shell"

## UWX1H100MCL1GB
designator C?, comment 10uF
CAP ALUM 10UF 20% 50V SMD; Manufacturer: Nichicon; Manufacturer Part no:: UWX1H100MCL1GB; ComponentLink1Description: New link; ComponentLink1URL: https://www.digikey.co.uk/en/products/detail/nichicon/UWX1H100MCL1GB/589876?s=N4IgTCBcDaIKoHUAaBGAEigDJgsgYQBkUBxAIRAF0BfIA; Value: 10uF; Package: 0.260" L x 0.260" W (6.60mm x 6.60mm)
footprint UWX1H100MCL1GB
pins: 1, 2

## WR06X3302FTL
designator R?, comment 33K
33kΩ 0603 Chip Resistor - Surface Mount ROHS; Manufacturer: Walsin; Manufacturer Part No: WR06X3302FTL; Value: 33K; Package: 0603
footprint Res0603
pins: 1, 2

## WSL0603R0500FEA
designator R?, comment 0.05R
RES 0.05 OHM 1% 1/10W 0603; Manufacturer: Vishay Dale; Manufacturer Part Number: WSL0603R0500FEA18; Resistance: 50mR; Temperature Coefficient: 75ppm/°C; Power Rating: 200mW; Supplier 1: Mouser; Stock 1: 4596; Pricing 1: 1=0.96, 10=0.717, 50=0.717, 100=0.621, 1000=0.375, 10000=0.326 (USD); Case/Package: 0603; Case Code (Metric): 1608; Case Code (Imperial): 0603; Min Operating Temperature: -65°C; Max Operating Temperature: 170°C; Tolerance: 1%; Resistor Type: Metal Strip; Packaging: Tape and Reel; Package Quantity: 1; Number of Terminations: 2; Termination: SMD/SMT; Max Power Dissipation: 200mW; Features: Moisture Resistant; Series: WSL-HP; Resistance Tolerance: 1%; Length: 0.06inch; Width: 0.03inch; Height: 0.018inch; REACH SVHC: Unknown; Lead Free: Lead Free; RoHS Compliant: Yes; ComponentLink1URL: http://www.vishay.com/docs/31057/wslhigh.pdf?src-supplier=Digi-Key; ComponentLink1Description: http://www.vishay.com/docs/31057/wslhigh.pdf?src-supplier=Digi-Key; ComponentLink2URL: http://www.mouser.com/ds/2/427/wslhigh-101698.pdf?src-supplier=Mouser; ComponentLink2Description: http://www.mouser.com/ds/2/427/wslhigh-101698.pdf?src-supplier=Mouser; Supplier Part Number 1: 71-WSL0603R0500FEA18
footprint Res0603
pins: 1, 2